# Altium schematic symbol library SN74HC74N.SchLib: 1 symbol
Pins are listed as number, name and electrical type; pins without a type are passive.

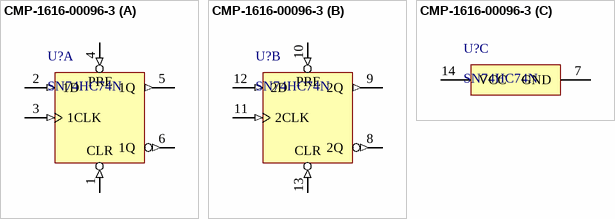
[diagram p0: symbol CMP-1616-00096-3]

## CMP-1616-00096-3
designator U?, comment SN74HC74N
Dual D-Type Positive-Edge-Triggered Flip-Flops With Clear and Preset, N0014A, TUBE; Manufacturer: Texas Instruments; VCC(Min)(V): 2; F @ Nom Voltage(Max)(Mhz): 28; Voltage(Nom)(V): 3.3,5; Output Drive (IOL/IOH)(Max)(mA): 5.2/-5.2; Output: 3S; ICC @ Nom Voltage(Max)(mA): 0.04; Output Logic: Inverted,Non-inverted; Technology Family: HC; 3-State Output: No; VCC(Max)(V): 6; Output Type: CMOS; tpd @ Nom Voltage(Max)(ns): 37; Rating: Catalog; Operating Temperature Range(C): -40 to 85; DatasheetVersion: SCLS094D; Code_JEDEC: MS-001; Bits(#): 2; Schmitt Trigger: No; PackageReference: N0014A; Generic Part Number: SN74HC74; Input Type: CMOS
footprint N0014A (DIP, 14-Leads, Body 19.7x6.6mm, Pitch 2.54mm)
part A pins: 1 1~{CLR} (in), 2 1D (in), 3 1CLK (in), 4 1~{PRE} (in), 5 1Q (out), 6 1Q (out)
part B pins: 8 2Q (out), 9 2Q (out), 10 2~{PRE} (in), 11 2CLK (in), 12 2D (in), 13 2~{CLR} (in)
part C pins: 7 GND (power), 14 VCC (power)
part A text: PRE; CLR
part B text: PRE; CLR